# Altium schematic symbol library RC0805FR-0712K1L.SchLib: 1 symbol
Pins are listed as number, name and electrical type; pins without a type are passive.

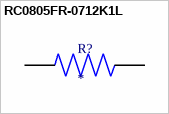
[diagram p0: symbol RC0805FR-0712K1L]

## RC0805FR-0712K1L
designator R?
12.1 kOhms Â±1% 0.125W, 1/8W Chip Resistor 0805 (2012 Metric) Moisture Resistant Thick Film; MPN: RC0805FR-0712K1L; MANUFACTURER: Yageo; Package: 2012 Yageo; DATASHEET_URL: https://s3.amazonaws.com/snapeda/datasheet/RC0805FR-0712K1L_Yageo.pdf; Value: *; SOURCE_URL: https://www.snapeda.com/parts/RC0805FR-0712K1L/Yageo/view-part/
footprint RESC2012X60N
pins: 1, 2